# Altium schematic symbol library LM75ADP_118.SchLib: 1 symbol
Pins are listed as number, name and electrical type; pins without a type are passive.

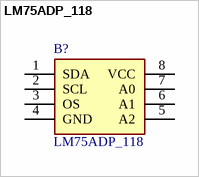
[diagram p0: symbol LM75ADP_118]

## LM75ADP_118
designator B?
Board Mount Temperature Sensors TEMP SENSOR DIGITAL; Manufacturer_Name: NXP; Manufacturer_Part_Number: LM75ADP,118; Geometry.Height: 1.1mm; Mouser Part Number: 771-LM75ADP-T; Mouser Price/Stock: https://www.mouser.co.uk/ProductDetail/NXP-Semiconductors/LM75ADP118?qs=LOCUfHb8d9vvCdlTDgESAg%3D%3D; Arrow Part Number: LM75ADP,118; Arrow Price/Stock: https://www.arrow.com/en/products/lm75adp118/nxp-semiconductors.html?utm_currency=USD&region=europe; Datasheet Link: http://www.nxp.com/docs/en/data-sheet/LM75A.pdf
footprint SOP65P490X110-8N
pins: 1 SDA, 2 SCL, 3 OS, 4 GND, 5 A2, 6 A1, 7 A0, 8 VCC